# Altium footprint library aksima_footprint.PcbLib: 64 footprints (part 3 of 4)
Each footprint in its own frame and in the unit in brackets; x right, y up, seen from the top. Pads: shape width x height; smd on the part's side, far side on the other; paste and mask are expansions set on the pad; w line width, h text height; cw(c..) or ccw(c..) is an arc to the next point about the centre after c.
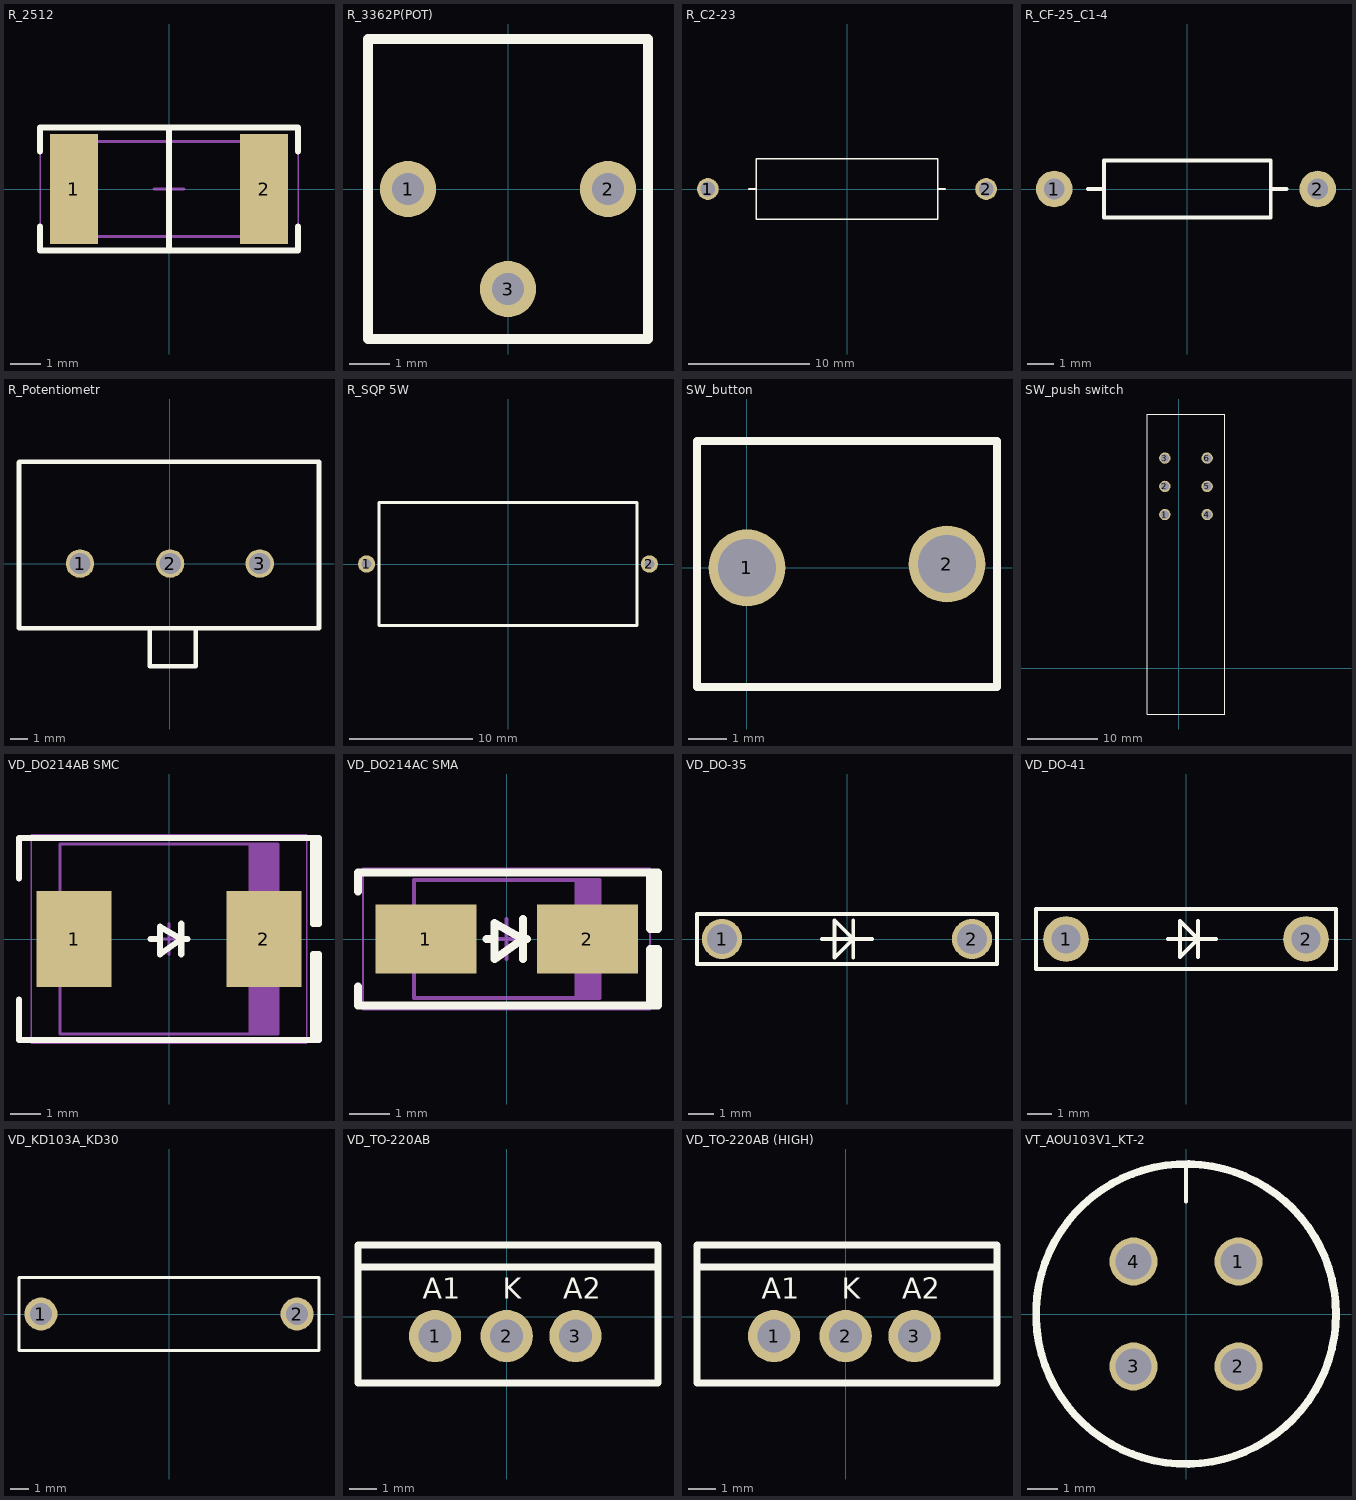
[diagram p2: the footprints below, top view; thin cyan lines are the x and y axes]

## R_2512 [mm] "Chip Resistor, 2-Leads, Body 6.30x3.15mm, IPC Medium Density"
height 0.6
pads (2):
  rect 1.6x3.65 smd: 1(-3.175,0) 2(3.175,0)
Top Overlay:
  lines w0.2: -4.3,-1.25 -4.3,-2.05 4.3,-2.05 4.3,-1.25 ; -4.3,1.25 -4.3,2.05 4.3,2.05 4.3,1.25 ; 0,-2.05 0,2.05
Mechanical 13:
  lines w0.1: -3.149,-1.575 -3.149,1.575 3.15,1.575 3.15,1.225 3.15,-1.575 -3.149,-1.575
Mechanical 15:
  lines w0.05: -4.3,-2.1 -4.3,2.1 4.3,2.1 4.3,-2.1 -4.3,-2.1
  lines w0.1: -0.5,0 0.5,0 ; 0,-0.5 0,0.5
3D body "RES - 2512.step": height 0.7, standoff 0, extent -3.15,-1.575 3.15,1.575

## R_3362P(POT) [mm] "Trimmer potentiometer, 3362P series"
pads (3):
  round 1.4 hole 0.8: 1(-2.5,0) 2(2.5,0) 3(0,-2.5)
Top Overlay:
  lines w0.254: -3.5,-3.75 3.5,-3.75 3.5,3.75 -3.5,3.75 -3.5,-3.75
3D body "3362 smd resistor pot v2.step": height 4.56, standoff -5.84, extent -3.3,-3.495 3.3,3.495

## R_C2-23 [mm] "Resistor footprint, C2-23"
pads (2):
  round 1.8 hole 1.2: 1(-11.5,0) 2(11.5,0)
Top Overlay:
  lines w0.15: -8.1,0 -7.5,0 ; 7.5,0 8.1,0 ; -7.5,-2.5 -1.4,-2.5 7.5,-2.5 7.5,2.5 -7.5,2.5 -7.5,-2.5
3D body "Res-2w-5-15mm-900.step": height 6.5, standoff -1.5, extent -11.83,-2.5 11.83,2.5

## R_CF-25_C1-4 [mm] "Axial resistor, CF-25 / C1-4"
pads (2):
  round 1.4 hole 0.8: 1(-5.1,0) 2(5,0)
Top Overlay:
  lines w0.15: -3.8,0 -3.2,0 ; 3.2,0 3.8,0 ; -3.2,-1.1 -3.2,1.1 3.2,1.1 3.2,-1.1 0,-1.1 -3.2,-1.1
3D body "2.7R 0.4.STEP": height 2.93, standoff -2.54, extent -5.47,-1.156 5.3,1.156

## R_Potentiometr [mm] "Potentiometer, original library value 50 kOhm"
pads (3):
  round 1.6 hole 1.2: 1(-5.062,0) 2(0.013,0) 3(5.063,0)
Top Overlay:
  lines w0.254: -1.125,-3.65 -1.125,-5.775 1.45,-5.775 1.45,-3.65 ; -8.5,-3.65 -8.5,5.7 -8.475,5.725 8.4,5.725 8.4,-3.65 -8.5,-3.65
3D body "POT10K.step": height 22.5, standoff -3, extent -8.486,-18.45 8.511,5.75

## R_SQP 5W [mm] "Axial wirewound power resistor, SQP 5 W"
pads (2):
  round 1.4 hole 0.8: 1(-11.5,0) 2(11.5,0)
Top Overlay:
  lines w0.254: -10.5,-5 10.5,-5 10.5,5 -10.5,5 -10.5,-5
3D body "RES_SQPH_5W_900mil_0R_J(5%).STEP": height 10, standoff -3.6, extent -11.88,-5 11.88,5

## SW_button [mm] "Switch footprint, button"
pads (2):
  round 2 hole 1.5: 1(0,0) 2(5.2,0.1)
Top Overlay:
  lines w0.2: -1.3,-3.1 -1.3,-0.825 -1.3,0.625 -1.3,3.3 6.5,3.3 6.5,-3.1 -1.3,-3.1

## SW_push switch [mm] "Switch footprint, push switch"
pads (6):
  round 1.6 hole 1.2 unplated: 1(-2,21.75) 2(-2,25.75) 3(-2,29.75) 4(4,21.75) 5(4,25.75) 6(4,29.75)
Top Overlay:
  lines w0.15: -4.5,-6.5 6.5,-6.5 6.5,36 -4.5,36 -4.5,-6.5
3D body "2 - -2.stp": height 12.5, standoff -3, extent -4,-6 6,35.5

## VD_DO214AB SMC [mm] "Molded Diode, 2-Leads, Body 6.85x5.90mm, IPC Medium Density"
height 2.62
pads (2):
  rect 2.45x3.15 smd: 1(-3.1,0) 2(3.1,0)
Top Overlay:
  lines w0.2: -4.9,-1.975 -4.9,-3.3 4.9,-3.3 4.9,-0.5 4.7,-0.5 4.7,-3.3 ; -4.9,1.975 -4.9,3.3 4.9,3.3 4.9,0.5 4.7,0.5 4.7,3.3 ; -0.6,0 -0.3,0 ; 0.4,-0.5 0.4,0.5 ; 0.6,0 0.4,0 ; 0.4,0 -0.3,-0.5 -0.3,0.4 0.4,0
Mechanical 13:
  rectangle: 2.599,-3.11 3.555,3.11
  lines w0.1: -3.555,-3.11 3.555,-3.11 3.555,3.11 -3.555,3.11 -3.555,-3.11
Mechanical 15:
  lines w0.05: -4.5,-3.4 4.5,-3.4 4.5,3.4 -4.5,3.4 -4.5,-3.4
  lines w0.1: -0.5,0 0.5,0 ; 0,-0.5 0,0.5
3D body "SMC.STEP": height 2.6, standoff 0, extent -3.97,-2.952 3.97,2.952

## VD_DO214AC SMA [mm] "Molded Diode, 2-Leads, Body 4.30x2.60mm, IPC Medium Density"
height 2.4
pads (2):
  rect 2.5x1.7 smd: 1(-2,0) 2(2,0)
Top Overlay:
  lines w0.2: -3.683,-1.175 -3.683,-1.651 3.75,-1.651 3.75,-0.254 3.556,-0.254 3.556,-1.651 ; -3.683,1.175 -3.683,1.651 3.75,1.651 3.75,0.254 3.556,0.254 3.556,1.651 ; -0.5,0 -0.3,0 ; 0.4,-0.5 0.4,0.5 ; 0.5,0 0.4,0 ; 0.4,0 -0.3,-0.5 -0.3,0.4 0.4,0
Mechanical 13:
  rectangle: 1.681,-1.46 2.3,1.46
  lines w0.1: -2.3,-1.46 2.3,-1.46 2.3,1.46 -2.3,1.46 -2.3,-1.46
Mechanical 15:
  lines w0.05: -3.556,-1.75 3.556,-1.75 3.556,1.75 -3.556,1.75 -3.556,-1.75
  lines w0.1: -0.5,0 0.5,0 ; 0,-0.5 0,0.5
3D body "SMA.STEP": height 2.4, standoff 0, extent -2.6,-1.375 2.6,1.375

## VD_DO-35 [mm] "Diode footprint, DO-35"
pads (2):
  round 1.6 hole 1.2: 1(-5,0) 2(5,0)
Top Overlay:
  lines w0.15: -1,0 1,0 ; 0.25,-0.75 0.25,0.75 ; -6,-1 -6,0 -6,1 6,1 6,-1 -6,-1 ; -0.5,-0.75 -0.5,0.75 0.25,0 -0.5,-0.75 ; -0.5,0 -0.5,0
3D body "DIODE-1N4148.STEP": height 1.85, standoff -2.5, extent -5.31,-0.853 5.31,0.853

## VD_DO-41 [mm] "Diode footprint, DO-41"
pads (2):
  round 1.9 hole 1.2: 1(-5,0) 2(5,0)
Top Overlay:
  lines w0.15: -0.75,0 1.25,0 ; 0.5,-0.75 0.5,0.75 ; -6.25,-1.25 6.25,-1.25 6.25,1.25 -6.25,1.25 -6.25,0.25 -6.25,-1.25 ; -0.25,-0.75 0.5,0 -0.25,0.75 -0.25,-0.75 ; -0.25,0 -0.25,0
3D body "DO-204AL-BK.stp": height 2.8, standoff -2.5, extent -5.48,-1.34 5.48,1.34

## VD_KD103A_KD30 [mm] "Diode footprint, KD103A KD30"
pads (2):
  round 1.8 hole 1.2: 1(-7,0) 2(7,0)
Top Overlay:
  lines w0.15: -8.2,-2 8.2,-2 8.2,2 -8.2,2 -8.2,-2
3D body "User Library-KD29-C.STEP": height 5.82, standoff -1, extent -7.675,-1.818 7.675,1.818

## VD_TO-220AB [mm] "Diode footprint, TO-220AB"
pads (3):
  round 1.9 hole 1.2: 1(-2.6,-0.7) 2(0,-0.7) 3(2.5,-0.7)
Top Overlay:
  lines w0.254: -5.4,1.8 5.5,1.8 ; -5.4,-2.4 5.5,-2.4 5.5,2.6 -5.4,2.6 -5.4,-2.4
  text "A1" at -3.046,0.654 h0.75
  text "A2" at 2.054,0.654 h0.75
  text "K" at -0.146,0.654 h0.75
3D body "TO-220AB.stp": height 21.58, standoff -9.73, extent -5.345,-2.25 5.345,2.56

## VD_TO-220AB (HIGH) [mm] "Diode footprint, TO-220AB (HIGH)"
pads (3):
  round 1.9 hole 1.2: 1(-2.6,-0.7) 2(0,-0.7) 3(2.5,-0.7)
Top Overlay:
  lines w0.254: -5.4,1.8 5.5,1.8 ; -5.4,-2.4 5.5,-2.4 5.5,2.6 -5.4,2.6 -5.4,-2.4
  text "A1" at -3.046,0.654 h0.75
  text "A2" at 2.054,0.654 h0.75
  text "K" at -0.146,0.654 h0.75
3D body "TO-220AB.stp": height 28.58, standoff -2.73, extent -5.345,-2.25 5.345,2.56

## VT_AOU103V1_KT-2 [mm] "Transistor footprint, AOU103V1 KT-2"
pads (4):
  round 1.6 hole 1.2 unplated: 1(1.75,1.75) 2(1.75,-1.75) 3(-1.75,-1.75) 4(-1.75,1.75)
Top Overlay:
  circle w0.254: c0,0 r5
  lines w0.15: 0,3.75 0,5
3D body "??-2.STEP": height 6.6, standoff -3, extent -4.7,-4.7 4.7,5.4